# Altium schematic symbol library 2N7002LT1G.SchLib: 1 symbol
Pins are listed as number, name and electrical type; pins without a type are passive.

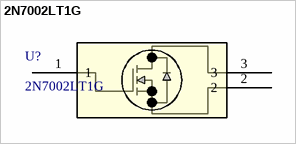
[diagram p0: symbol 2N7002LT1G]

## 2N7002LT1G
designator U?
Description; Manufacturer_Name: onsemi; Copyright: Copyright (C) 2026 Ultra Librarian. All rights reserved.; Manufacturer_Part_Number: 2N7002LT1G; RefDes: RefDes; Type: Type
footprint SOT-23_3L_ONS
pins: 1, 2, 3